# EAGLE library part CON_ARDUINO (library dp_devices.v6)
Arduino board connector layout
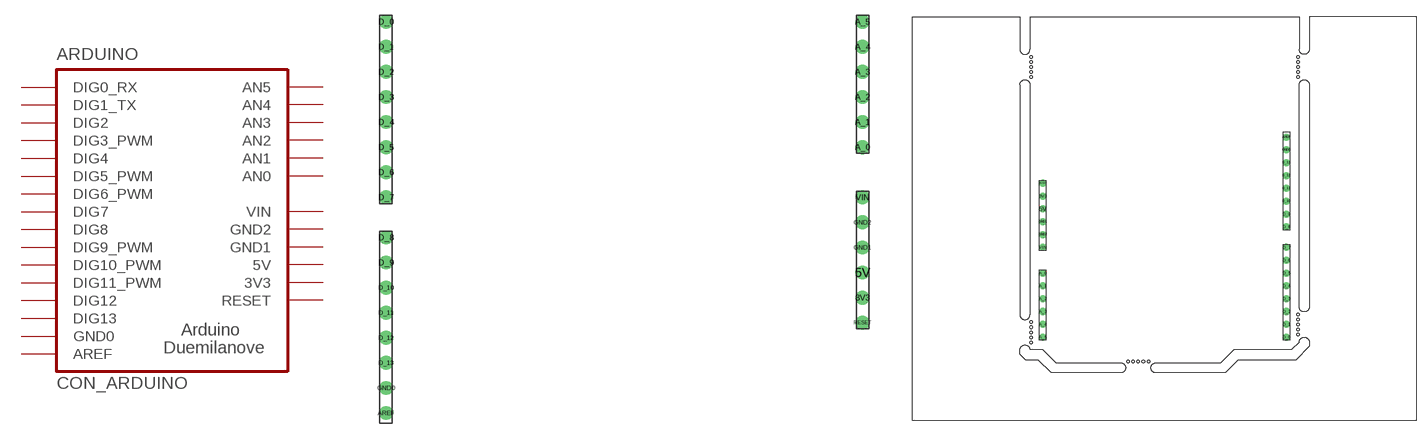
[diagram p5: symbol with the pads of CON_ARDUINO; footprints CON_ARDUINO, CON_ARDUINO_NB]

Designator prefix ARDUINO

## CON_ARDUINO  [CON_ARDUINO]
3V3  3V3
5V  5V
A_0  AN0  in
A_1  AN1  in
A_2  AN2  in
A_3  AN3  in
A_4  AN4  in
A_5  AN5  in
AREF  AREF
D_0  DIG0_RX
D_1  DIG1_TX
D_2  DIG2
D_3  DIG3_PWM
D_4  DIG4
D_5  DIG5_PWM
D_6  DIG6_PWM
D_7  DIG7
D_8  DIG8
D_9  DIG9_PWM
D_10  DIG10_PWM
D_11  DIG11_PWM
D_12  DIG12
D_13  DIG13
GND0  GND0  sup
GND1  GND1  sup
GND2  GND2  sup
RESET  RESET  in
VIN  VIN  pwr

## CON_ARDUINO-NB  [CON_ARDUINO_NB]
Pads as for CON_ARDUINO

## Footprint CON_ARDUINO (pad centres in mm)
drill 0.8 pad 1.4: 3V3 25.4,-12.7; 5V 25.4,-10.16; A_0 25.4,2.54; A_1 25.4,5.08; A_2 25.4,7.62; A_3 25.4,10.16; A_4 25.4,12.7; A_5 25.4,15.24; AREF -22.86,-24.384; D_0 -22.86,15.24; D_1 -22.86,12.7; D_2 -22.86,10.16; D_3 -22.86,7.62; D_4 -22.86,5.08; D_5 -22.86,2.54; D_6 -22.86,0; D_7 -22.86,-2.54; D_8 -22.86,-6.604; D_9 -22.86,-9.144; D_10 -22.86,-11.684; D_11 -22.86,-14.224; D_12 -22.86,-16.764; D_13 -22.86,-19.304; GND0 -22.86,-21.844; GND1 25.4,-7.62; GND2 25.4,-5.08; RESET 25.4,-15.24; VIN 25.4,-2.54

## Footprint CON_ARDUINO_NB (pad centres in mm)
Derived from Arduino Diecimila Break-offs with eagle limitation 100x80 mm
drill 0.8 pad 1.4: 3V3 25.87,44.44; 5V 25.87,41.9; A_0 25.87,29.2; A_1 25.87,26.66; A_2 25.87,24.12; A_3 25.87,21.58; A_4 25.87,19.04; A_5 25.87,16.5; AREF 74.13,56.124; D_0 74.13,16.5; D_1 74.13,19.04; D_2 74.13,21.58; D_3 74.13,24.12; D_4 74.13,26.66; D_5 74.13,29.2; D_6 74.13,31.74; D_7 74.13,34.28; D_8 74.13,38.344; D_9 74.13,40.884; D_10 74.13,43.424; D_11 74.13,45.964; D_12 74.13,48.504; D_13 74.13,51.044; GND0 74.13,53.584; GND1 25.87,39.36; GND2 25.87,36.82; RESET 25.87,46.98; VIN 25.87,34.28
hole 0.5 at 23.58,70
hole 0.5 at 23.58,71
hole 0.5 at 23.58,72
hole 0.5 at 23.58,69
hole 0.5 at 23.58,68
hole 0.5 at 23.58,17.46
hole 0.5 at 23.58,18.46
hole 0.5 at 23.58,19.46
hole 0.5 at 23.58,16.46
hole 0.5 at 23.58,15.46
hole 0.5 at 76.42,70
hole 0.5 at 76.42,71
hole 0.5 at 76.42,72
hole 0.5 at 76.42,69
hole 0.5 at 76.42,68
hole 0.5 at 76.42,18.984
hole 0.5 at 76.42,19.984
hole 0.5 at 76.42,20.984
hole 0.5 at 76.42,17.984
hole 0.5 at 76.42,16.984
hole 0.5 at 44.793,11.67
hole 0.5 at 43.793,11.67
hole 0.5 at 42.793,11.67
hole 0.5 at 45.793,11.67
hole 0.5 at 46.793,11.67